# Altium schematic symbol library Components - 26.10.26 - 02.19.SchLib: 1 symbol
Pins are listed as number, name and electrical type; pins without a type are passive.

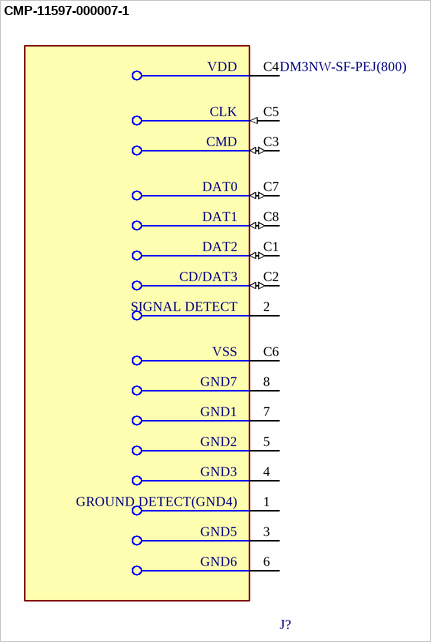
[diagram p0: symbol CMP-11597-000007-1]

## CMP-11597-000007-1
designator J?, comment DM3NW-SF-PEJ(800)
CONN MICROSD CARD PUSH-PUSH SMD; RoHS Compliant: Yes
footprint FP-DM3NW-SF-PEJ_800-MFG
pins: 1 GROUND DETECT(GND4) (power), 2 SIGNAL DETECT (power), 3 GND5 (power), 4 GND3 (power), 5 GND2 (power), 6 GND6 (power), 7 GND1 (power), 8 GND7 (power), C1 DAT2 (io), C2 CD/DAT3 (io), C3 CMD (io), C4 VDD (power), C5 CLK (in), C6 VSS (power), C7 DAT0 (io), C8 DAT1 (io)